# Altium schematic symbol library SDR0403-220ML.SchLib: 1 symbol
Pins are listed as number, name and electrical type; pins without a type are passive.

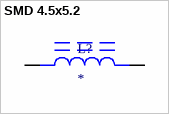
[diagram p0: symbol SMD 4.5x5.2]

## SMD 4.5x5.2
designator L?
SMD 4.5x5.2; MP: SDR0403-220ML; Package: None; Price: None; Value: *; Availability: Unavailable
footprint IND_SDR0403-220ML
pins: 1, 2